# Altium footprint library RBM_ALTIUM_PCB_LIBRARY.PcbLib: 107 footprints (part 1 of 7)
Each footprint in its own frame and in the unit in brackets; x right, y up, seen from the top. Pads: shape width x height; smd on the part's side, far side on the other; paste and mask are expansions set on the pad; w line width, h text height; cw(c..) or ccw(c..) is an arc to the next point about the centre after c.
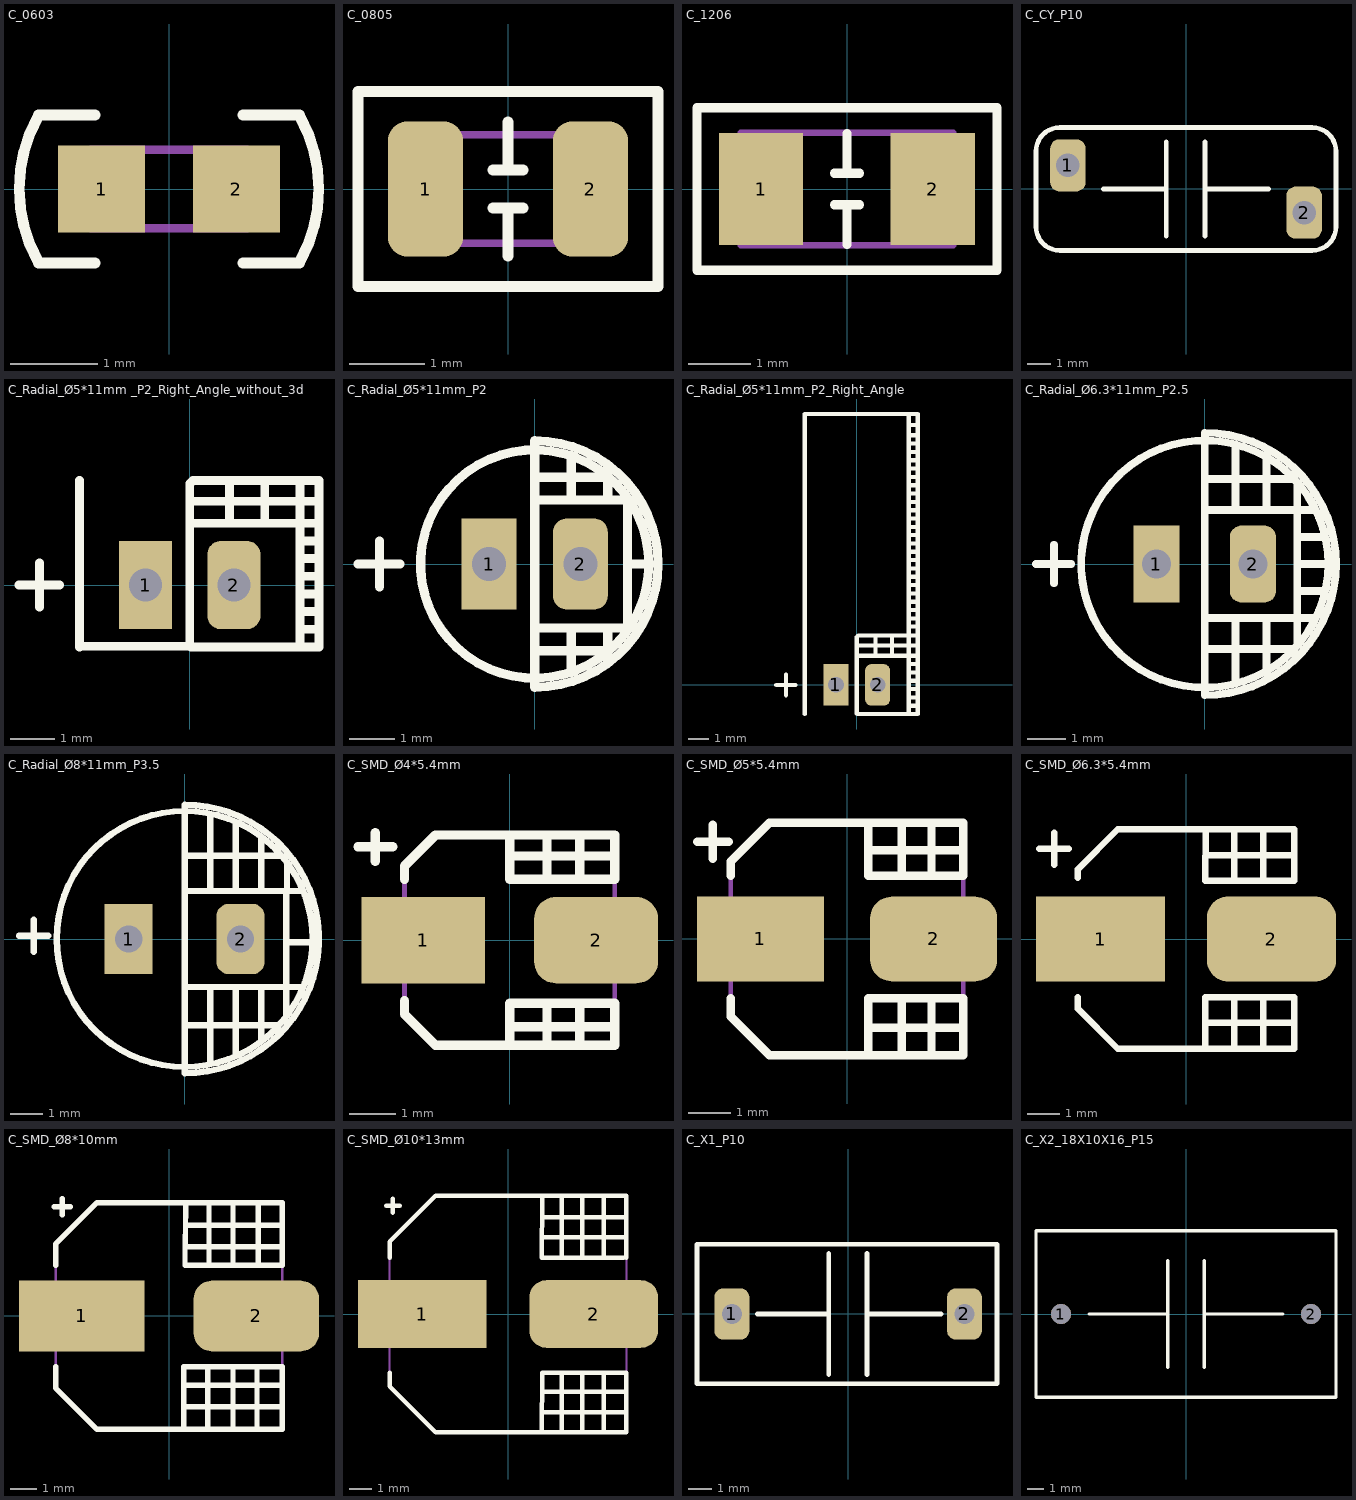
[diagram p0: the footprints below, top view; thin cyan lines are the x and y axes]

## C_0603 [mm] "0603 Multilayer Ceramic Capacitors MLCC - SMD/SMT RoHS"
height 0.87
pads (2):
  rect 1x1 smd: 1(-0.775,0) 2(0.775,0)
Top Overlay:
  lines w0.125: -1.508,-0.836 cw(c0.001,0) -1.508,0.836 ; -1.5,-0.85 -0.85,-0.85 ; -1.5,0.85 -0.85,0.85 ; 0.85,-0.85 1.5,-0.85 ; 0.85,0.85 1.5,0.85 ; 1.508,-0.836 ccw(c-0.001,0) 1.508,0.836
Assembly Top:
  lines w0.1: -0.9,-0.45 0.9,-0.45 0.9,0.45 -0.9,0.45 -0.9,-0.45
3D body "Chip2PinSM127P600-8N.step": height 0.87, standoff 0, extent -0.85,-0.45 0.85,0.45

## C_0805 [mm]
height 1
pads (2):
  rrect50% 1x1.8 smd: 1(-1.1,0) 2(1.1,0)
Top Overlay:
  lines w0.15: -0.2,-0.254 0.2,-0.254 ; -0.2,0.254 0.2,0.254 ; 0,-0.889 0,-0.254 ; 0,0.254 0,0.889 ; -2,-1.3 -2,1.3 2,1.3 2,-1.3 -2,-1.3
Mechanical 13:
  lines w0.1: -1.1,-0.725 -1.1,0.725 1.1,0.725 1.1,-0.725 -1.1,-0.725
3D body "C_0805.step": height 1, standoff 0, extent -1.1,-0.725 1.1,0.725

## C_1206 [mm] "NM1206B104K451CEGN; 100nF ±10% 450V X7R 1206 Multilayer Ceramic Capacitors MLCC - SMD/SMT RoHS"
height 1.8
pads (2):
  rect 1.35x1.8 smd: 1(-1.375,0) 2(1.375,0)
Top Overlay:
  lines w0.15: -0.2,-0.254 0.2,-0.254 ; -0.2,0.254 0.2,0.254 ; 0,-0.889 0,-0.254 ; 0,0.254 0,0.889 ; -2.4,-1.3 2.4,-1.3 2.4,1.3 -2.4,1.3 -2.4,-1.3
Assembly Top:
  lines w0.1: -1.7,-0.9 -1.7,0.9 1.7,0.9 1.7,-0.9 -1.7,-0.9
3D body "Chip2PinSM127P600-8N.step": height 1.8, standoff 0, extent -1.7,-0.9 1.7,0.9

## C_CY_P10 [mm] "CY1222ME1IEF46X0A2; 2.2nF ±20% 400VAC 10 Through Hole,P=10mm Suppression Capacitors RoHS"
pads (2):
  rrect50% 1.5x2.2 hole 1: 1(-5,1) 2(5,-1)
Top Overlay:
  lines w0.2: -3.5,-0.001 -0.84,0 ; -0.84,-1.999 -0.84,1.999 ; 0.807,-1.999 0.807,1.999 ; 0.807,0 3.5,0 ; -6.35,-1.6 ccw(c-5.35,-1.6) -5.35,-2.6 5.35,-2.6 ccw(c5.35,-1.6) 6.35,-1.6 6.35,1.6 ccw(c5.35,1.6) 5.35,2.6 -5.35,2.6 ccw(c-5.35,1.6) -6.35,1.6 -6.35,-1.6
3D body "CY-2.2nF-400V.STEP": height 9.75, standoff -1.5, extent -5.658,-2.193 5.658,2.193

## C_Radial_Ø5*11mm _P2_Right_Angle_without_3d [mm]
pads (2):
  rect 1.2x2 hole 0.75: 1(-1,0)
  rrect50% 1.2x2 hole 0.75: 2(1,0)
Top Overlay:
  lines w0.2: -3.87,0.002 -2.954,0.002 ; -3.403,-0.498 -3.403,0.502 ; -2.5,2.369 -2.5,-1.4 cw(c-2.487,-1.4) -2.487,-1.387 0.013,-1.387 ; 0.1,1.4 2.929,1.4 ; 0.1,1.9 2.9,1.9 ; 0.9,1.4 0.9,2.369 ; 1.7,1.5 1.7,2.3 ; 2.5,2.369 2.5,-1.4 0.025,-1.4 0,-1.375 0,2.3 ; 2.518,-0.2 2.896,-0.2 ; 2.518,0.2 2.882,0.2 ; 2.518,0.6 2.896,0.6 ; 2.518,1 2.882,1 ; 2.551,-1.4 2.929,-1.4 2.929,2.369 0.069,2.369 0.001,2.3 ; 2.551,-1 2.929,-1 ; 2.551,-0.6 2.914,-0.6 ; 0,2.3 0.001,2.3

## C_Radial_Ø5*11mm_P2 [mm]
pads (2):
  rect 1.2x2 hole 0.75: 1(-1,0)
  rrect50% 1.2x2 hole 0.75: 2(1,0)
Top Overlay:
  lines w0.2: -3.87,0.002 -2.954,0.002 ; -3.403,-0.498 -3.403,0.502 ; 0,-1.4 2.029,-1.4 2.029,1.4 0,1.4 ; 0.1,-1.9 1.6,-1.9 ; 0.1,1.9 1.6,1.9 ; 0.8,-2.369 0.8,-1.4 ; 0.8,1.4 0.8,2.369 ; 1.6,-1.921 1.6,-1.4 ; 1.6,1.5 1.6,1.921 ; 2.092,0 2.5,0 ; 2.5,0 ccw(c0,0) 2.5,0 ; 0,-2.7 ccw(c0,0) 0,2.7 0,-2.7
3D body "User Library-Cap electro 5x11x2mm.step": height 11.53, standoff -3.27, extent -2.525,-2.525 2.526,2.525

## C_Radial_Ø5*11mm_P2_Right_Angle [mm]
pads (2):
  rect 1.2x2 hole 0.75: 1(-1,0)
  rrect50% 1.2x2 hole 0.75: 2(1,0)
Top Overlay:
  lines w0.2: -3.87,0.002 -2.954,0.002 ; -3.403,-0.498 -3.403,0.502 ; -2.5,-1.4 -2.5,13.026 2.5,13.026 ; 0.1,1.4 2.929,1.4 ; 0.1,1.9 2.9,1.9 ; 0.9,1.4 0.9,2.369 ; 1.7,1.5 1.7,2.3 ; 2.518,-0.2 2.896,-0.2 ; 2.518,0.2 2.882,0.2 ; 2.518,0.6 2.896,0.6 ; 2.518,1 2.882,1 ; 2.518,3.6 2.896,3.6 ; 2.518,4 2.882,4 ; 2.518,4.4 2.896,4.4 ; 2.518,4.8 2.882,4.8 ; 2.518,6 2.896,6 ; 2.518,6.4 2.882,6.4 ; 2.518,6.8 2.896,6.8 ; 2.518,7.2 2.882,7.2 ; 2.518,8.4 2.896,8.4 ; 2.518,8.8 2.882,8.8 ; 2.518,9.2 2.896,9.2 ; 2.518,9.6 2.882,9.6 ; 2.518,10.8 2.896,10.8 ; 2.518,11.2 2.882,11.2 ; 2.518,11.6 2.896,11.6 ; 2.518,12 2.882,12 ; 2.518,12.5 2.882,12.5 ; 2.551,-1.4 2.929,-1.4 2.929,13.026 2.5,13.026 ; 2.551,-1 2.929,-1 ; 2.551,-0.6 2.914,-0.6 ; 2.551,2.8 2.929,2.8 ; 2.551,3.2 2.914,3.2 ; 2.551,5.2 2.929,5.2 ; 2.551,5.6 2.914,5.6 ; 2.551,7.6 2.929,7.6 ; 2.551,8 2.914,8 ; 2.551,10 2.929,10 ; 2.551,10.4 2.914,10.4 ; 2.929,2.369 0.069,2.369 0.001,2.3 ; 0,2.3 0.001,2.3 ; 0,2.3 0,-1.375 0.025,-1.4 2.5,-1.4 2.5,13.026
3D body "User Library-Cap electro 5x11x2mm RA.step": height 5.53, standoff -3, extent -2.5,-0.295 2.551,13.026

## C_Radial_Ø6.3*11mm_P2.5 [mm]
pads (2):
  rect 1.2x2 hole 0.75: 1(-1.25,0)
  rrect50% 1.2x2 hole 0.75: 2(1.25,0)
Top Overlay:
  lines w0.2: -4.37,0.002 -3.454,0.002 ; -3.903,-0.498 -3.903,0.502 ; 0,-1.4 2.8,-1.4 ; 0,1.4 2.8,1.4 ; 0.1,-2.2 2.3,-2.2 ; 0.1,2.2 2.3,2.2 ; 0.8,-3.1 0.8,-1.4 ; 0.8,1.4 0.8,3.1 ; 1.6,-2.7 1.6,-1.4 ; 1.6,1.5 1.6,2.7 ; 2.4,-2.1 2.4,2.1 ; 2.4,-0.7 3.1,-0.7 ; 2.4,0 3.2,0 ; 2.4,0.7 3.1,0.7 ; 3.2,0 ccw(c0,0) 3.2,0 ; 0,-3.401 ccw(c0,0) 0,3.402 0,-3.401
3D body "User Library-Cap electro 6_3x11x2_5mm.step": height 11.53, standoff -3.01, extent -3.175,-3.175 3.176,3.176

## C_Radial_Ø8*11mm_P3.5 [mm]
pads (2):
  rect 1.5x2.2 hole 0.85: 1(-1.75,0)
  rrect50% 1.5x2.2 hole 0.85: 2(1.75,0)
Top Overlay:
  circle w0.2: c0,0 r4
  lines w0.1: 0,0 0,4
  lines w0.2: -5.178,0.1 -4.262,0.1 ; -4.711,-0.4 -4.711,0.6 ; 0,-2.7 2.9,-2.7 ; 0,-1.5 3.7,-1.5 ; 0,1.5 3.7,1.5 ; 0,2.6 3,2.6 ; 0.8,-3.9 0.8,-1.5 ; 0.8,1.5 0.8,3.9 ; 1.6,-3.6 1.6,-1.5 ; 1.6,1.5 1.6,3.6 ; 2.4,-3.2 2.4,-1.6 ; 2.4,1.5 2.4,3.2 ; 3.176,-2.4 3.176,-1.524 3.176,1.476 3.2,1.5 3.2,2.4 ; 3.2,-0.1 3.9,-0.1 ; 0,-4.2 ccw(c0,0) 0,4.2 0,-4.2
3D body "User Library-Cap electro 8x11_5x3_5mm.step": height 12.03, standoff -3.48, extent -4.025,-4.025 4.026,4.026

## C_SMD_Ø4*5.4mm [mm]
height 5.8
pads (2):
  rect 2.65x1.85 smd: 1(-1.85,0)
  rrect50% 2.65x1.85 smd: 2(1.85,0)
Top Overlay:
  lines w0.2: -3.245,2 -2.5,2 ; -2.878,1.687 -2.878,2.3 ; -2.25,-1.3 -2.25,-1.587 -1.587,-2.25 2.25,-2.25 2.25,-1.35 0,-1.35 0,-2.163 ; -2.25,1.3 -2.25,1.587 -1.587,2.25 2.25,2.25 2.25,1.3 0,1.3 ; 0,-1.85 2.25,-1.85 ; 0,1.8 2.25,1.8 ; 0,1.9 0,1.3 ; 0,2.25 0,1.3 ; 0.8,-2.175 0.8,-1.35 ; 0.8,1.3 0.8,2.25 ; 1.5,-2.175 1.5,-1.35 ; 1.5,1.3 1.5,2.25
Mechanical 13:
  lines w0.1: -2.25,-1.587 -1.587,-2.25 2.25,-2.25 2.25,2.25 -1.587,2.25 -2.25,1.587 -2.25,-1.587
3D body "CAPAE4643X58M.step": height 5.8, standoff 0, extent -2.275,-2.25 2.275,2.25

## C_SMD_Ø5*5.4mm [mm]
height 5.8
pads (2):
  rect 3x2 smd: 1(-2.05,0)
  rrect50% 3x2 smd: 2(2.05,0)
Top Overlay:
  lines w0.2: -3.545,2.3 -2.8,2.3 ; -3.178,1.9 -3.178,2.7 ; -2.75,-1.4 -2.75,-1.837 -1.838,-2.75 2.75,-2.75 2.75,-1.4 0.5,-1.4 ; -2.75,1.5 -2.75,1.837 -1.838,2.75 2.75,2.75 2.75,1.5 0.5,1.5 ; 0.5,-2.75 0.5,-1.4 ; 1.3,-1.4 1.3,-2.75 2,-2.75 2,-1.4 ; 1.3,1.5 1.3,2.75 0.5,2.75 0.5,1.5 ; 2,1.5 2,2.75 ; 2.75,-2.1 0.5,-2.1 0.5,-1.4 ; 2.75,2.1 0.5,2.1 0.5,1.5
Mechanical 13:
  lines w0.1: -2.75,-1.837 -2.75,1.837 -1.838,2.75 2.75,2.75 2.75,-2.75 -1.838,-2.75 -2.75,-1.837
3D body "CAPAE5653X58M.step": height 5.8, standoff 0, extent -2.775,-2.75 2.775,2.75

## C_SMD_Ø6.3*5.4mm [mm] "SMD 6.3x5.4mm Aluminum Electrolytic Capacitors - SMD RoHS"
height 6
pads (2):
  rect 4x2.65 smd: 1(-2.65,0)
  rrect50% 4x2.65 smd: 2(2.65,0)
Top Overlay:
  lines w0.2: -4.545,2.8 -3.629,2.8 ; -4.078,2.3 -4.078,3.3 ; -3.35,-1.8 -3.35,-2.163 -2.112,-3.4 3.35,-3.4 3.35,-1.8 0.6,-1.8 0.6,-3.4 ; -3.35,1.9 -3.35,2.163 -2.112,3.4 3.35,3.4 3.35,1.8 0.602,1.8 0.619,3.4 ; 0.6,-2.6 3.35,-2.6 ; 0.61,2.6 3.35,2.6 ; 1.5,-3.3 1.5,-1.8 ; 1.5,1.9 1.5,3.4 ; 2.4,-3.4 2.4,-1.8 ; 2.4,1.9 2.4,3.4
3D body: height 5.8, standoff 0, extent -3.4,-3.4 3.4,3.4
3D body: height 1.94, standoff 0, extent -3.4,-3.4 3.4,3.4

## C_SMD_Ø8*10mm [mm] "VKMD1002G4R7MV; 4.7uF ±20% 400V SMD,8x10mm Aluminum Electrolytic Capacitors - SMD RoHS"
height 10.5
pads (2):
  rect 4.7x2.65 smd: 1(-3.275,0)
  rrect50% 4.7x2.65 smd: 2(3.275,0)
Top Overlay:
  lines w0.2: -4.3,4.1 -3.7,4.1 ; -4.25,-1.9 -4.25,-2.7 -2.7,-4.25 4.25,-4.25 4.25,-1.9 0.55,-1.9 0.55,-4.25 ; -4.25,1.9 -4.25,2.7 -2.7,4.25 4.25,4.25 4.25,1.9 0.603,1.9 0.628,4.252 ; -4,3.8 -4,4.4 ; 0.55,-3.4 4.181,-3.4 ; 0.55,-2.6 4.19,-2.6 ; 0.61,2.6 4.25,2.6 ; 0.619,3.4 4.25,3.4 ; 1.45,-4.2 1.45,-2 ; 1.5,1.9 1.5,4.25 ; 2.4,-4.2 2.4,-2 ; 2.4,1.9 2.4,4.25 ; 3.3,-4.25 3.3,-1.9 ; 3.35,2 3.35,4.25
Assembly Top:
  lines w0.1: -4.25,-2.7 -2.7,-4.25 4.25,-4.25 4.25,4.25 -2.7,4.25 -4.25,2.7 -4.25,-2.7
3D body "CAPAE9083X105M.step": height 10.5, standoff 0, extent -4.5,-4.25 4.5,4.25

## C_SMD_Ø10*13mm [mm] "VKME1302W6R8MV; 6.8uF ±20% 450V SMD,10x13mm Aluminum Electrolytic Capacitors - SMD RoHS"
height 13.5
pads (2):
  rect 5.7x3 smd: 1(-3.8,0)
  rrect50% 5.7x3 smd: 2(3.8,0)
Top Overlay:
  lines w0.2: -5.4,4.8 -4.8,4.8 ; -5.25,-2.598 -5.25,-3.2 -3.2,-5.25 5.25,-5.25 5.25,-2.598 ; -5.25,2.5 -5.25,3.2 -3.2,5.25 5.25,5.25 5.25,2.5 ; -5.1,4.5 -5.1,5.1 ; 1.49,-5.25 1.517,-2.598 5.167,-2.598 ; 1.5,-4.35 5.14,-4.35 ; 1.5,3.4 5.14,3.4 ; 1.508,-3.45 5.14,-3.45 ; 1.508,4.3 5.14,4.3 ; 1.517,5.152 1.49,2.5 5.14,2.5 ; 2.39,-5.25 2.39,-2.6 ; 2.39,2.5 2.39,5.15 ; 3.29,-5.25 3.29,-2.6 ; 3.29,2.5 3.29,5.15 ; 4.24,-5.25 4.24,-2.6 ; 4.24,2.5 4.24,5.15
Assembly Top:
  lines w0.1: -5.25,-3.2 -3.2,-5.25 5.25,-5.25 5.25,5.25 -3.2,5.25 -5.25,3.2 -5.25,-3.2
3D body "CAPAE110103X135M.step": height 13.5, standoff 0, extent -5.5,-5.25 5.5,5.25

## C_X1_P10 [mm]
pads (2):
  rrect50% 1.5x2.2 hole 0.85: 1(-5,0) 2(5,0)
Top Overlay:
  lines w0.2: -3.9,-0.001 -0.84,0 ; -0.84,-2.6 -0.84,2.6 ; 0.807,-2.6 0.807,2.6 ; 0.807,0 4,0 ; -6.5,-3 6.4,-3 6.4,3 -6.5,3 -6.5,-3
3D body: height 1.5, standoff -2, extent 4.699,-0.254 5.297,0.345
3D body: height 1.5, standoff -2, extent -5.297,-0.254 -4.699,0.345
3D body: height 11.89, standoff 0.68, extent -6.414,-2.921 6.35,2.921

## C_X2_18X10X16_P15 [mm] "STE(Songtian Elec) X2P2474KQ1B0180160100ES0"
pads (2):
  round 1.2 / inner rrect50% 2x3 / far side rrect50% 2x3 hole 1.2: 1(-7.5,0) 2(7.5,0)
Top Overlay:
  lines w0.2: -5.8,0 -1.1,0 ; -1.1,-3.2 -1.1,3.2 ; 1.1,-3.2 1.1,3.2 ; 1.1,0 5.8,0 ; -9,-5 9,-5 9,5 -9,5 -9,-5
3D body: height 16, standoff 0.2, extent -9,-5 9,5
3D body: height 3, standoff -2, extent -7.898,-0.399 -7.102,0.399
3D body: height 3, standoff -2, extent 7.103,-0.399 7.9,0.399